# Altium schematic symbol library ECS-240-8-36-RWN-TR3.SchLib: 1 symbol
Pins are listed as number, name and electrical type; pins without a type are passive.

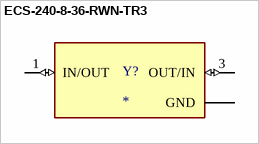
[diagram p0: symbol ECS-240-8-36-RWN-TR3]

## ECS-240-8-36-RWN-TR3
designator Y?
MF: {'manufacturer': u'ECS Inc.'}; MP: ECS-240-8-36-RWN-TR3; Package: None; Price: None; Value: *; Availability: Unavailable
footprint XTAL_ECS-240-8-36-RWN-TR3
pins: 1 IN/OUT (io), 2 GND (power), 3 OUT/IN (io), 4 GND (power)